# Altium integrated library Senior Design.IntLib: 1 symbol
Pins are listed as number, name and electrical type; pins without a type are passive.

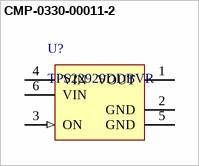
[diagram p0: symbol CMP-0330-00011-2]

## CMP-0330-00011-2
designator U?, comment TPS22929DDBVR
Low Input Voltage, 1.8 A Single Channel Load Switch with Controlled Turn-On, 1.8 V Logic Compatible, 1.8 A, 1.4 to 5.5 V, -40 to 85 degC, 6-pin SOT-23 (DBV), Green (RoHS & no Sb/Br); Manufacturer: Texas Instruments; Active High Enable: TRUE; Iin(nA): 10000; Output Rise Time(ÂµS): 4500; Imax(A): 1.8; Vin(V): 1.4 - 5.5; Control Logic: 1.8-V Logic Compatible; SubFamily: Non Current Limited Load Switch; HBM ESD(kV): 2; Quick Output Discharge Transistor: Yes; rON @1.8V(mOhm): 85; DatasheetVersion: SLVSB39; ComponentLink1URL: http://www.ti.com/general/docs/lit/getliterature.tsp?genericPartNumber=TPS22929D&fileType=pdf; Mounting Technology: Surface Mount; PackageDescription: 6-Pin Plastic Small-Outline Package, 2.9 x 1.6 mm Body, 0.95 mm Pitch, 2.8 mm Lead Span; PackageVersion: revK, Mar-2006; Code_JEDEC: MO-178-AB*; PartNumber: TPS22929DDBVR; PackageReference: DBV0006A; Eco-Plan: Green (RoHS & no Sb/Br); ComponentLink1Description: Datasheet
footprint DBV0006A_L (SOT23, 6-Leads, Body 3.05x1.75mm, Pitch 0.95mm, IPC High Density)
footprint DBV0006A_N (SOT23, 6-Leads, Body 3.05x1.75mm, Pitch 0.95mm, IPC Medium Density)
footprint DBV0006A_M (SOT23, 6-Leads, Body 3.05x1.75mm, Pitch 0.95mm, IPC Low Density)
pins: 1 VOUT (power) "Switch output", 2 GND (power) "Ground", 3 ON (in) "Switch control input, active high. Do not leave floating", 4 VIN (power) "Switch input, bypass this input with a ceramic capacitor to ground", 5 GND (power) "Ground", 6 VIN (power) "Switch input, bypass this input with a ceramic capacitor to ground"